# Altium footprint library DIN41612_32_2row_straight_mother.PcbLib: 1 footprints
Each footprint in its own frame and in the unit in brackets; x right, y up, seen from the top. Pads: shape width x height; smd on the part's side, far side on the other; paste and mask are expansions set on the pad; w line width, h text height; cw(c..) or ccw(c..) is an arc to the next point about the centre after c.
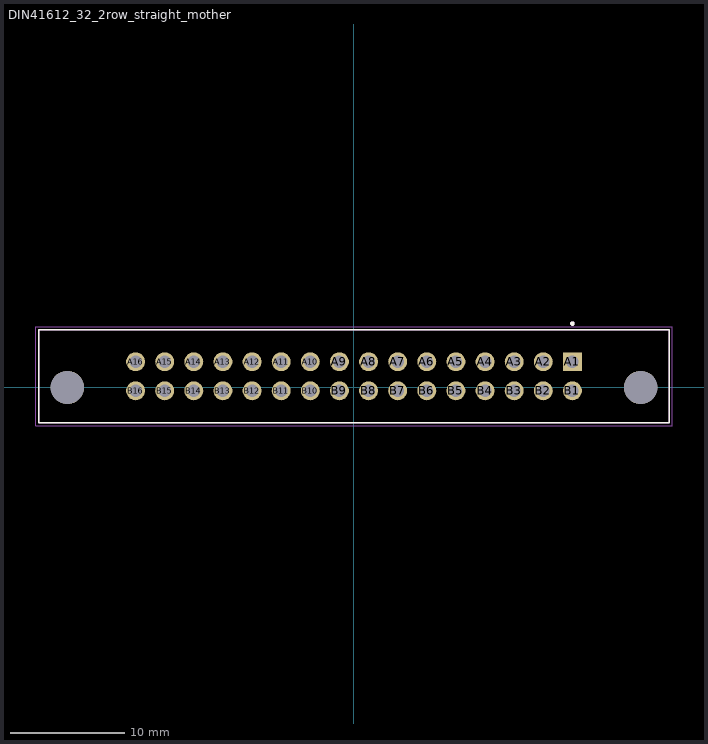
[diagram p0: the footprint, top view; thin cyan lines are the x and y axes]

## DIN41612_32_2row_straight_mother [mm]
pads (34):
  rect 1.65x1.65 / inner round 1.65 / far side rect 1.65x1.65 hole 1.1: A1(19.05,2.24)
  round 1.65 hole 1.1: A2(16.51,2.24) A3(13.97,2.24) A4(11.43,2.24) A5(8.89,2.24) A6(6.35,2.24) A7(3.81,2.24) A8(1.27,2.24) A9(-1.27,2.24) A10(-3.81,2.24) A11(-6.35,2.24) A12(-8.89,2.24) A13(-11.43,2.24) A14(-13.97,2.24) A15(-16.51,2.24) A16(-19.05,2.24) B1(19.05,-0.3) B2(16.51,-0.3) B3(13.97,-0.3) B4(11.43,-0.3) B5(8.89,-0.3) B6(6.35,-0.3) B7(3.81,-0.3) B8(1.27,-0.3) B9(-1.27,-0.3) B10(-3.81,-0.3) B11(-6.35,-0.3) B12(-8.89,-0.3) B13(-11.43,-0.3) B14(-13.97,-0.3) B15(-16.51,-0.3) B16(-19.05,-0.3)
  round 2.9 hole 2.9 unplated: ""(-25,0) ""(25,0)
Top Overlay:
  circle w0.2: c19.05,5.57 r0.1
  lines w0.127: -27.5,-3.08 27.5,-3.08 27.5,5.02 -27.5,5.02 -27.5,-3.08
Mechanical 13:
  circle w0.2: c19.05,5.57 r0.1
  lines w0.127: -27.5,-3.08 27.5,-3.08 27.5,5.02 -27.5,5.02 -27.5,-3.08
Mechanical 15:
  lines w0.05: -27.75,-3.33 27.75,-3.33 27.75,5.27 -27.75,5.27 -27.75,-3.33
3D body "9222326850.stp": height 11.6, standoff -4.5, extent -27.375,-2.95 27.525,5.05